# Altium schematic symbol library TitansLib.SchLib: 462 symbols (part 9 of 24)
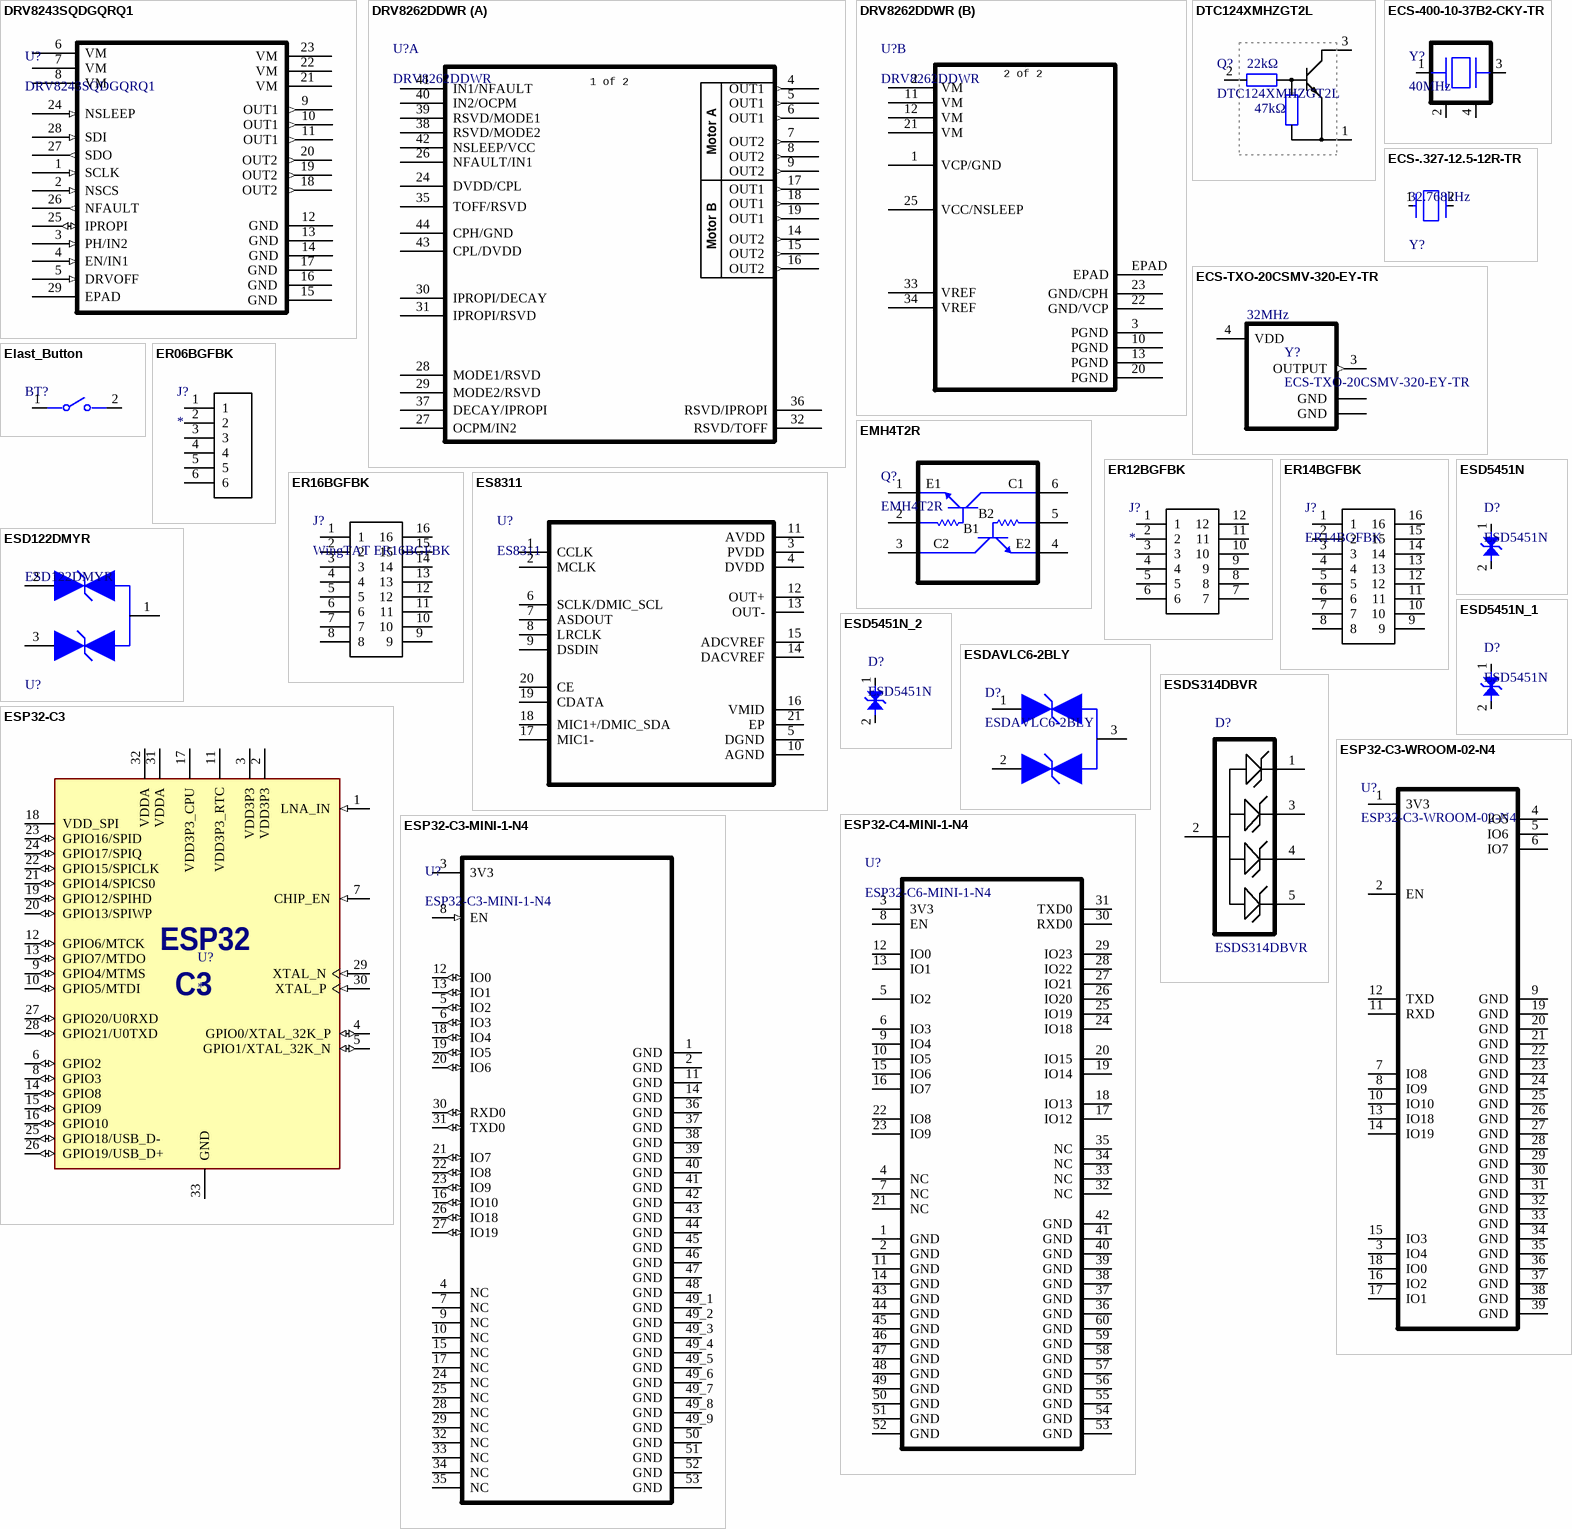
[diagram p25: symbols DRV8243SQDGQRQ1 to ESP32-C4-MINI-1-N4]

## EMH4T2R
designator Q?
Small Signal Bipolar Transistor, 0.1A I(C), 50V V(BR)CEO, 2-Element, NPN, Silicon; Manufacturer: Rohm; Package Body Material: Plastic; Max Collector Current: 100mA; DC Current Gain-Min (hFE): 100; Number of Elements: 2; Power Dissipation-Max (Abs): 150mW; Time @ Peak Reflow Temperature-Max (s): 10s; Transistor Application: SWITCHING; Frequency: 250MHz; Qualification Status: Not Qualified; Supplier: Digikey; Supplier Part Number: EMH4T2RCT-ND; Manufacturer Part Number: EMH4T2R; RoHS: Yes; Category: BJTs; Stock: 19698; Pricing: 1=0.53, 10=0.327, 100=0.2076, 500=0.15612, 1000=0.13948, 2000=0.12547 (USD); Pins: 5; Package Shape: Rectangular; Terminal Finish: Copper; Transistor Element Material: SILICON; Max Operating Temperature: 150°C; JESD-609 Code: e2; Polarity/Channel Type: NPN; Collector-emitter Voltage-Max: 50V; JESD-30 Code: R-PDSO-F5; Moisture Sensitivity Level: 1; Package Style: SMALL OUTLINEMeter; Peak Reflow Temperature (Cel): 260°C; Surface Mount: Yes; Terminal Form: Flat; Terminal Position: DUAL; Reach SVHC Compliant: Yes; RoHS Compliant: Yes; ComponentLink1URL: https://datasheet.ciiva.com:443/pdfs/VipMasterIC/IC/ROHM/ROHM-S-A0002134070/ROHM-S-A0002134651-1.pdf?src-supplier=IHS+Markit; ComponentLink1Description: https://datasheet.ciiva.com:443/pdfs/VipMasterIC/IC/ROHM/ROHM-S-A0002134070/ROHM-S-A0002134651-1.pdf?src-supplier=IHS+Markit; ComponentLink2URL: https://datasheet.ciiva.com/12316/emh4-90829-12316374.pdf?src-supplier=Mouser; ComponentLink2Description: https://datasheet.ciiva.com/12316/emh4-90829-12316374.pdf?src-supplier=Mouser; ComponentLink3URL: https://datasheet.ciiva.com/6361/emh4-6361344.pdf?src-supplier=Digikey; ComponentLink3Description: https://datasheet.ciiva.com/6361/emh4-6361344.pdf?src-supplier=Digikey; ComponentLink4URL: https://datasheet.ciiva.com/29322/140552-da-01-en-transistor-emh-4t2r-sc-107c-29322668.pdf?src-supplier=Conrad; ComponentLink4Description: https://datasheet.ciiva.com/29322/140552-da-01-en-transistor-emh-4t2r-sc-107c-29322668.pdf?src-supplier=Conrad; ComponentLink5URL: https://datasheet.ciiva.com/6361/emh4-6361349.pdf?src-supplier=Digikey; ComponentLink5Description: https://datasheet.ciiva.com/6361/emh4-6361349.pdf?src-supplier=Digikey; ComponentLink6URL: https://datasheet.ciiva.com/11209/emh4-11209231.pdf?src-supplier=Avnet; ComponentLink6Description: https://datasheet.ciiva.com/11209/emh4-11209231.pdf?src-supplier=Avnet; ComponentLink7URL: https://datasheet.ciiva.com/16437/emh4-16437708.pdf?src-supplier=Future+Electronics; ComponentLink7Description: https://datasheet.ciiva.com/16437/emh4-16437708.pdf?src-supplier=Future+Electronics
pins: 1 E1, 2 B1, 3 C2, 4 E2, 5 B2, 6 C1

## ER06BGFBK
designator J?
2.54mm Through Hole,Right Angle,P=2.54mm Edgeboard Connectors RoHS; Manufacturer_Name: WingTAT; Manufacturer_Part_Number: ER06BGFBK; Datasheet Link: https://www.lcsc.com/product-detail/C5173325.html; Height: 7.50mm; LCSC_Part Number: C5173325
footprint ER06BGFBK
pins: 1, 2, 3, 4, 5, 6

## ER12BGFBK
designator J?
2.54mm Through Hole,Right Angle,P=2.54mm Edgeboard Connectors RoHS; Manufacturer_Name: WingTAT; Manufacturer_Part_Number: ER12BGFBK; Datasheet Link: https://www.lcsc.com/product-detail/C5173328.html; Height: 7.50mm; LCSC_Part Number: C5173328
footprint ER12BGFBK
pins: 1, 2, 3, 4, 5, 6, 7, 8, 9, 10, 11, 12

## ER14BGFBK
designator J?
2.54mm Through Hole,Right Angle,P=2.54mm Edgeboard Connectors RoHS; Manufacturer Part Number: ER16BGFBK; Manufacturer: *
footprint ER14BGFBK
pins: 1, 2, 3, 4, 5, 6, 7, 8, 9, 10, 11, 12, 13, 14, 15, 16

## ER16BGFBK
designator J?, comment WingTAT ER16BGFBK
2.54mm Through Hole,Right Angle,P=2.54mm Edgeboard Connectors RoHS; Manufacturer: *; Manufacturer Part Number: ER16BGFBK
footprint ER16BGFBK
pins: 1, 2, 3, 4, 5, 6, 7, 8, 9, 10, 11, 12, 13, 14, 15, 16

## ES8311
designator U?
Low Power Mono Audio CODEC; Manufacturer: Everest Semiconductor; Manufacturer Part Number: ES8311; Supplier: LCSC; Supplier Part Number: C962342; Supplier Unit Price: 0.5532; Datasheet: https://www.lcsc.com/datasheet/C962342.pdf?spm=wm.sxq.inf.ggs&lcsc_vid=QFJcU1NQFVUKBFFURwRcVQVVFgcLUAIDRwddAlJQTlQxVlNeRFBcUlBQTlZeXjsOAxUeFF5JWBYZEEoBGA4JCwFIFA4DSA%3D%3D
footprint QFN40P300X300X60_HS-21N (QFN, 20-Leads, Body 3.00x3.00mm, Pitch 0.40mm, Thermal Pad 1.70x1.70mm, IPC Medium Density)
pins: 1 CCLK, 2 MCLK, 3 PVDD, 4 DVDD, 5 DGND, 6 SCLK/DMIC_SCL, 7 ASDOUT, 8 LRCLK, 9 DSDIN, 10 AGND, 11 AVDD, 12 OUT+, 13 OUT-, 14 DACVREF, 15 ADCVREF, 16 VMID, 17 MIC1-, 18 MIC1+/DMIC_SDA, 19 CDATA, 20 CE, 21 EP

## ESD122DMYR
designator U?
TVS DIODE 3.6V 8.4V 3X2SON; Min Breakdown Voltage: 5.1V; Number of Bidirectional Channels: 2; Power Line Protection: No; Peak Pulse Current: 2.5A; Interface: USB; Peak Pulse Power: 20W; Packaging: Tape and Reel; Clamping Voltage: 8.4V; Number of Pins: 3; Reverse Standoff Voltage: 3.6V; Mount: Surface Mount; Min Operating Temperature: -40°C; Number of Channels: 2; RoHS Compliant: Yes; Max Operating Temperature: 125°C; Resistor Type: Zener
footprint ESD122DMYR
pins: 1 GND (power), 2 IO1, 3 IO2

## ESD5451N
designator D?
ESD Diode DFN1006-2L; Manufacturer: WillSemi; Manufacturer Part Number: ESD5451N-2/TR
footprint DFN65P101X53-2N (DFN, 2-Leads, Body 0.61x1.01mm, Pitch 0.65mm, IPC Medium Density)
pins: 1, 2

## ESD5451N_1
designator D?, comment ESD5451N
ESD Diode DFN1006-2L; Manufacturer: WillSemi; Manufacturer Part Number: ESD5451N-2/TR
footprint DFN65P101X53-2N (DFN, 2-Leads, Body 0.61x1.01mm, Pitch 0.65mm, IPC Medium Density)
pins: 1, 2

## ESD5451N_2
designator D?, comment ESD5451N
ESD Diode DFN1006-2L; Manufacturer: WillSemi; Manufacturer Part Number: ESD5451N-2/TR
footprint DFN65P101X53-2N (DFN, 2-Leads, Body 0.61x1.01mm, Pitch 0.65mm, IPC Medium Density)
pins: 1, 2

## ESDAVLC6-2BLY
designator D?
Trans Voltage Suppressor Diode, 140W, 5V V(RWM), Bidirectional, 2 Element, Silicon, TO-236; Manufacturer: STMicroelectronics; Supplier: Digikey; Supplier Part Number: 497-18402-1-ND; Manufacturer Part Number: ESDAVLC6-2BLY; RoHS: Yes; Category: TVS Diodes; Stock: 14860; Pricing: 1=0.4, 10=0.27, 100=0.107, 500=0.105, 1000=0.103 (USD); Diode Type: TRANS VOLTAGE SUPPRESSOR; Reach SVHC Compliant: Yes; RoHS Compliant: Yes; ComponentLink1URL: https://datasheet.ciiva.com:443/pdfs/VipMasterIC/IC/SGST/SGST-S-A0006719383/SGST-S-A0006719383-1.pdf?src-supplier=IHS+Markit; ComponentLink1Description: https://datasheet.ciiva.com:443/pdfs/VipMasterIC/IC/SGST/SGST-S-A0006719383/SGST-S-A0006719383-1.pdf?src-supplier=IHS+Markit; ComponentLink2URL: http://www.st.com/resource/en/datasheet/esdavlc6-2bly.pdf?src-supplier=Digikey; ComponentLink2Description: http://www.st.com/resource/en/datasheet/esdavlc6-2bly.pdf?src-supplier=Digikey
footprint SOT95P255X125-3N (SOT23, 3-Leads, Body 2.90x2.55mm, Pitch 0.95mm, IPC Medium Density)
pins: 1, 2, 3 GND (power)

## ESDS314DBVR
designator D?
Data-Line Surge and ESD Protection Diode Array; Manufacturer 1: Texas Instruments; Datasheet: http://www.ti.com/lit/gpn/esds314; Height: 1.45mm; Manufacturer Part Number 1: ESDS314DBVR; Supplier Part Number 1: 296-ESDS314DBVRCT-ND; Supplier Link 1: https://www.digikey.com.br/pt/products/detail/texas-instruments/ESDS314DBVR/9655798; Supplier 1: DigiKey; Supplier Unit Price 1: 0.219
footprint SOT95P280X145-5N
pins: 1, 2, 3, 4, 5

## ESP32-C3
designator U?
WiFi Modules (802.11) (Engineering Samples Only) SMD IC ESP32-C3, RISC-V single-core MCU, 2.4G Wi-Fi & BLE 5.0 combo, QFN 32-pin, 5*5 mm, 40 ~ 105C; MF: Espressif Systems; SnapEDA_Link: https://www.snapeda.com/parts/ESP32-C3/Espressif+Systems/view-part/?ref=snap; Package: VFQFN-32 Espressif Systems; Value: *; MP: ESP32-C3; Check_prices: https://www.snapeda.com/parts/ESP32-C3/Espressif+Systems/view-part/?ref=eda
footprint QFN50P500X500X90-33N
pins: 1 LNA_IN (in), 2 VDD3P3 (power), 3 VDD3P3 (power), 4 GPIO0/XTAL_32K_P (io), 5 GPIO1/XTAL_32K_N (io), 6 GPIO2 (io), 7 CHIP_EN (in), 8 GPIO3 (io), 9 GPIO4/MTMS (io), 10 GPIO5/MTDI (io), 11 VDD3P3_RTC (power), 12 GPIO6/MTCK (io), 13 GPIO7/MTDO (io), 14 GPIO8 (io), 15 GPIO9 (io), 16 GPIO10 (io), 17 VDD3P3_CPU (power), 18 VDD_SPI (power), 19 GPIO12/SPIHD (io), 20 GPIO13/SPIWP (io), 21 GPIO14/SPICS0 (io), 22 GPIO15/SPICLK (io), 23 GPIO16/SPID (io), 24 GPIO17/SPIQ (io), 25 GPIO18/USB_D- (io), 26 GPIO19/USB_D+ (io), 27 GPIO20/U0RXD (io), 28 GPIO21/U0TXD (io), 29 XTAL_N (in), 30 XTAL_P (in), 31 VDDA (power), 32 VDDA (power), 33 GND (power)
text: ESP32; C3

## ESP32-C3-MINI-1-N4
designator U?
SMD module, ESP32-C3FH4X, Chip Revision v1.1 or above, PCB antenna, -40C +105C; Manufacturer: Espressif Systems; Manufacturer Part Number: ESP32-C3-MINI-1-H4X; Supplier: Mouser; Supplier Part Number: 356-ESP32C3MINI1H4X; Category: RF Transceiver Modules and Modems; Stock: 5096; Pricing: 1=4, 10=3.57, 50=2.92, 100=2.77, 1000=2.32, 10000=2.21 (USD)
footprint ESP32-C3-MINI-1 (Footprint not found)
pins: 1 GND (power), 2 GND (power), 3 3V3 (power), 4 NC, 5 IO2 (io), 6 IO3 (io), 7 NC, 8 EN (in), 9 NC, 10 NC, 11 GND (power), 12 IO0 (io), 13 IO1 (io), 14 GND (power), 15 NC, 16 IO10 (io), 17 NC, 18 IO4 (io), 19 IO5 (io), 20 IO6 (io), 21 IO7 (io), 22 IO8 (io), 23 IO9 (io), 24 NC, 25 NC, 26 IO18 (io), 27 IO19 (io), 28 NC, 29 NC, 30 RXD0 (io), 31 TXD0 (io), 32 NC, 33 NC, 34 NC, 35 NC, 36 GND (power), 37 GND (power), 38 GND (power), 39 GND (power), 40 GND (power), 41 GND (power), 42 GND (power), 43 GND (power), 44 GND (power), 45 GND (power), 46 GND (power), 47 GND (power), 48 GND (power), 49_1 GND (power), 49_2 GND (power), 49_3 GND (power), 49_4 GND (power), 49_5 GND (power), 49_6 GND (power), 49_7 GND (power), 49_8 GND (power), 49_9 GND (power), 50 GND (power), 51 GND (power), 52 GND (power), 53 GND (power)

## ESP32-C3-WROOM-02-N4
designator U?
Module; Wi-Fi/Bluetooth; transceiver; 4MB FLASH/PSRAM/400KB SRAM/384KB ROM; 3.0-3.6V; 18x20x3.2mm; MF: Espressif Systems; Bandwidth: 72MHz; Data Rate: 150Mbps; Interface: CAN, I2C, I2S, SPI, UART, USB; Clock Frequency: 2.484GHz; Max Supply Voltage: 3.6V; Min Supply Voltage: 3V; Number of GPIO: 15; Value: *; SnapEDA_Link: https://www.snapeda.com/parts/ESP32-C3-WROOM-02-N4/Espressif+Systems/view-part/?ref=snap; Purchase-URL: https://pricing.snapeda.com/search/part/ESP32-C3-WROOM-02-N4/?ref=eda; Availability: In Stock; Price: None; Package: Package; Check_prices: https://www.snapeda.com/parts/ESP32-C3-WROOM-02-N4/Espressif+Systems/view-part/?ref=eda; MP: ESP32-C3-WROOM-02-N4; Supplier: DigiKey; Supplier Part Number: 1965-ESP32-C3-WROOM-02-N4CT-ND; Manufacturer: Espressif Systems; Manufacturer Part Number: ESP32-C3-WROOM-02-N4; RoHS: Compliant; Category: RF Receivers, Transceivers; Stock: 13111; Pricing: 1=3,28, 10=2,836, 25=2,6796, 100=2,4652, 250=2,33652 (USD); Ambient Temperature Range High: 85°C; Height: 3.35mm; Max Operating Temperature: 85°C; Min Operating Temperature: -40°C; ComponentLink1URL: https://datasheet.octopart.com:443/ESP32-C3-WROOM-02-N4-Espressif-Systems-datasheet-188867343.pdf?src-supplier=TME; ComponentLink1Description: https://datasheet.octopart.com:443/ESP32-C3-WROOM-02-N4-Espressif-Systems-datasheet-188867343.pdf?src-supplier=TME; ComponentLink2URL: https://datasheet.octopart.com:443/ESP32-C3-WROOM-02-N4-Espressif-Systems-datasheet-165560559.pdf?src-supplier=TME; ComponentLink2Description: https://datasheet.octopart.com:443/ESP32-C3-WROOM-02-N4-Espressif-Systems-datasheet-165560559.pdf?src-supplier=TME; ComponentLink3URL: https://datasheet.octopart.com:443/ESP32-C3-WROOM-02-N4-Espressif-Systems-datasheet-156944166.pdf?src-supplier=TME; ComponentLink3Description: https://datasheet.octopart.com:443/ESP32-C3-WROOM-02-N4-Espressif-Systems-datasheet-156944166.pdf?src-supplier=TME; ComponentLink4URL: https://datasheet.octopart.com:443/ESP32-C3-WROOM-02-N4-Espressif-Systems-datasheet-156947392.pdf?src-supplier=TME; ComponentLink4Description: https://datasheet.octopart.com:443/ESP32-C3-WROOM-02-N4-Espressif-Systems-datasheet-156947392.pdf?src-supplier=TME; Supplier 1: DigiKey; Supplier Part Number 1: 1965-ESP32-C3-WROOM-02-N4CT-ND; Supplier 2: DigiKey; Supplier Part Number 2: 1965-ESP32-C3-WROOM-02-N4DKR-ND; Supplier 3: Mouser; Supplier Part Number 3: 356-ESP32C3WROOM02N4
footprint MODULE_ESP32-C3-WROOM-02-H4
pins: 1 3V3, 2 EN, 3 IO4, 4 IO5, 5 IO6, 6 IO7, 7 IO8, 8 IO9, 9 GND, 10 IO10, 11 RXD, 12 TXD, 13 IO18, 14 IO19, 15 IO3, 16 IO2, 17 IO1, 18 IO0, 19 GND, 20 GND, 21 GND, 22 GND, 23 GND, 24 GND, 25 GND, 26 GND, 27 GND, 28 GND, 29 GND, 30 GND, 31 GND, 32 GND, 33 GND, 34 GND, 35 GND, 36 GND, 37 GND, 38 GND, 39 GND

## ESP32-C4-MINI-1-N4
designator U?, comment ESP32-C6-MINI-1-N4
Rf Txrx Module Bt Pcb Trace SMD; Manufacturer: Espressif Systems; Supplier: Mouser; Supplier Part Number: 356-ESP32C6MINI-1-N4; Manufacturer Part Number: ESP32-C6-MINI-1-N4; RoHS: No; Category: LDO; Stock: 4502; Pricing: 1=5.03, 10=4.5, 50=3.6, 100=3.45, 1000=2.86, 10000=2.73 (USD); ComponentLink1URL: https://datasheet.octopart.com/ESP32-C6-MINI-1-N4-Espressif-Systems-datasheet-188867343.pdf?src-supplier=TME; ComponentLink1Description: https://datasheet.octopart.com/ESP32-C6-MINI-1-N4-Espressif-Systems-datasheet-188867343.pdf?src-supplier=TME; Supplier 1: Mouser; Supplier Part Number 1: 356-ESP32C6MINI-1-N4; Supplier 2: Digikey; Supplier Part Number 2: 1965-ESP32-C6-MINI-1-N4CT-ND
footprint ESP32C6MINI1N4
pins: 1 GND, 2 GND, 3 3V3, 4 NC, 5 IO2, 6 IO3, 7 NC, 8 EN, 9 IO4 , 10 IO5, 11 GND, 12 IO0, 13 IO1, 14 GND, 15 IO6, 16 IO7, 17 IO12, 18 IO13, 19 IO14, 20 IO15, 21 NC, 22 IO8, 23 IO9, 24 IO18, 25 IO19, 26 IO20, 27 IO21, 28 IO22, 29 IO23, 30 RXD0, 31 TXD0, 32 NC, 33 NC, 34 NC, 35 NC, 36 GND, 37 GND, 38 GND, 39 GND, 40 GND, 41 GND, 42 GND, 43 GND, 44 GND, 45 GND, 46 GND, 47 GND, 48 GND, 49 GND, 50 GND, 51 GND, 52 GND, 53 GND, 54 GND, 55 GND, 56 GND, 57 GND, 58 GND, 59 GND, 60 GND

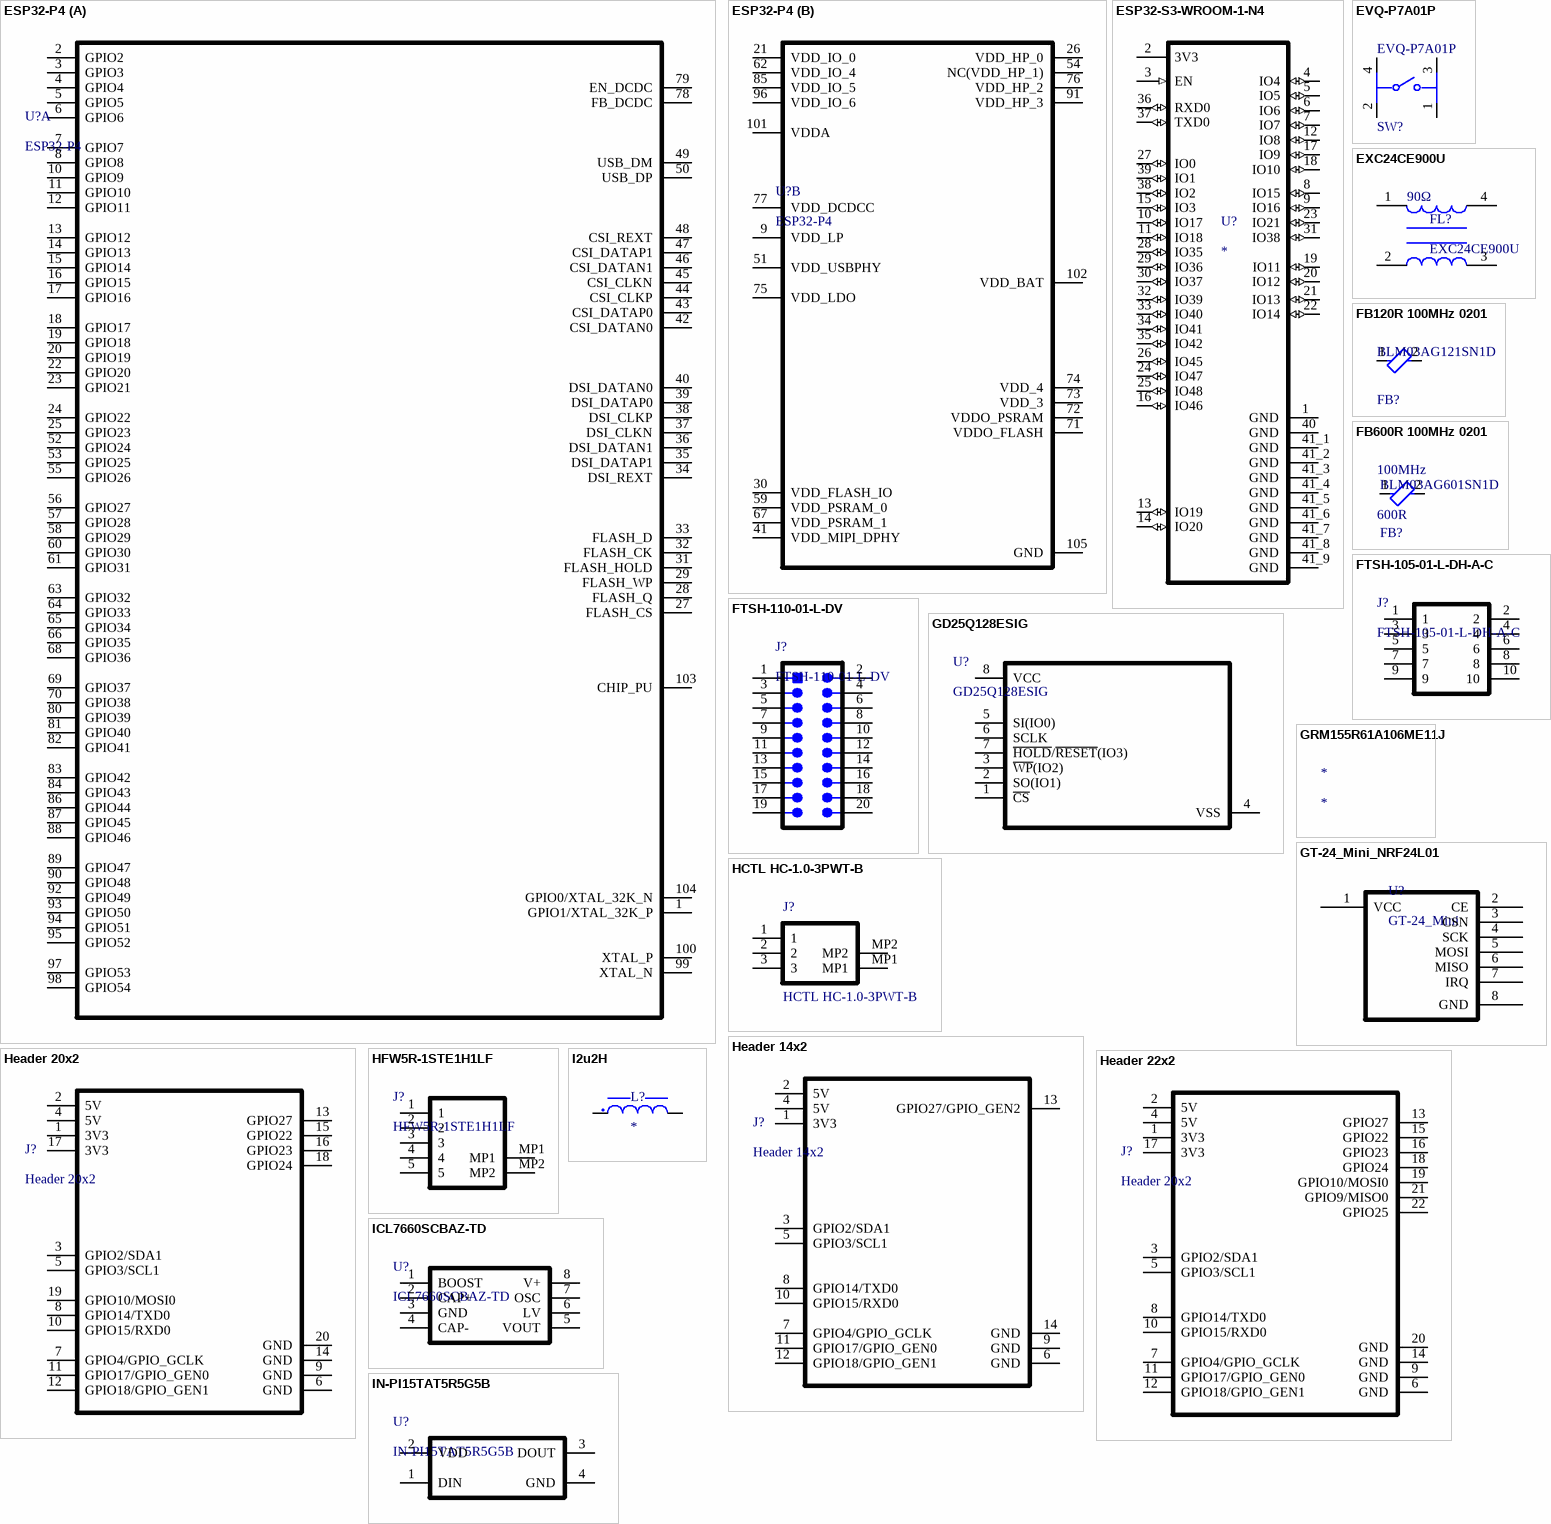
[diagram p5: symbols ESP32-P4 to IN-PI15TAT5R5G5B]

## ESP32-P4
designator U?
footprint QFN35P1000X1000X90_HS-105N (QFN, 104-Leads, Body 10.00x10.00mm, Pitch 0.35mm, Thermal Pad 7.50x7.50mm, IPC Medium Density)
part A pins: 1 GPIO1/XTAL_32K_P, 2 GPIO2, 3 GPIO3, 4 GPIO4, 5 GPIO5, 6 GPIO6, 7 GPIO7, 8 GPIO8, 10 GPIO9, 11 GPIO10, 12 GPIO11, 13 GPIO12, 14 GPIO13, 15 GPIO14, 16 GPIO15, 17 GPIO16, 18 GPIO17, 19 GPIO18, 20 GPIO19, 22 GPIO20, 23 GPIO21, 24 GPIO22, 25 GPIO23, 27 FLASH_CS, 28 FLASH_Q, 29 FLASH_WP, 31 FLASH_HOLD, 32 FLASH_CK, 33 FLASH_D, 34 DSI_REXT, 35 DSI_DATAP1, 36 DSI_DATAN1, 37 DSI_CLKN, 38 DSI_CLKP, 39 DSI_DATAP0, 40 DSI_DATAN0, 42 CSI_DATAN0, 43 CSI_DATAP0, 44 CSI_CLKP, 45 CSI_CLKN, 46 CSI_DATAN1, 47 CSI_DATAP1, 48 CSI_REXT, 49 USB_DM, 50 USB_DP, 52 GPIO24, 53 GPIO25, 55 GPIO26, 56 GPIO27, 57 GPIO28, 58 GPIO29, 60 GPIO30, 61 GPIO31, 63 GPIO32, 64 GPIO33, 65 GPIO34, 66 GPIO35, 68 GPIO36, 69 GPIO37, 70 GPIO38, 78 FB_DCDC, 79 EN_DCDC, 80 GPIO39, 81 GPIO40, 82 GPIO41, 83 GPIO42, 84 GPIO43, 86 GPIO44, 87 GPIO45, 88 GPIO46, 89 GPIO47, 90 GPIO48, 92 GPIO49, 93 GPIO50, 94 GPIO51, 95 GPIO52, 97 GPIO53, 98 GPIO54, 99 XTAL_N, 100 XTAL_P, 103 CHIP_PU, 104 GPIO0/XTAL_32K_N
part B pins: 9 VDD_LP, 21 VDD_IO_0, 26 VDD_HP_0, 30 VDD_FLASH_IO, 41 VDD_MIPI_DPHY, 51 VDD_USBPHY, 54 NC(VDD_HP_1), 59 VDD_PSRAM_0, 62 VDD_IO_4, 67 VDD_PSRAM_1, 71 VDDO_FLASH, 72 VDDO_PSRAM, 73 VDD_3, 74 VDD_4, 75 VDD_LDO, 76 VDD_HP_2, 77 VDD_DCDCC, 85 VDD_IO_5, 91 VDD_HP_3, 96 VDD_IO_6, 101 VDDA, 102 VDD_BAT, 105 GND

## ESP32-S3-WROOM-1-N4
designator U?
MF: {'manufacturer': u'Espressif Systems'}; MP: ESP32-S3-WROOM-1-N4; Package: None; Price: None; Value: *; Availability: Unavailable
footprint XCVR_ESP32-S3-WROOM-1-N4
pins: 1 GND (power), 2 3V3 (power), 3 EN (in), 4 IO4 (io), 5 IO5 (io), 6 IO6 (io), 7 IO7 (io), 8 IO15 (io), 9 IO16 (io), 10 IO17 (io), 11 IO18 (io), 12 IO8 (io), 13 IO19 (io), 14 IO20 (io), 15 IO3 (io), 16 IO46 (io), 17 IO9 (io), 18 IO10 (io), 19 IO11 (io), 20 IO12 (io), 21 IO13 (io), 22 IO14 (io), 23 IO21 (io), 24 IO47 (io), 25 IO48 (io), 26 IO45 (io), 27 IO0 (io), 28 IO35 (io), 29 IO36 (io), 30 IO37 (io), 31 IO38 (io), 32 IO39 (io), 33 IO40 (io), 34 IO41 (io), 35 IO42 (io), 36 RXD0 (io), 37 TXD0 (io), 38 IO2 (io), 39 IO1 (io), 40 GND (power), 41_1 GND (power), 41_2 GND (power), 41_3 GND (power), 41_4 GND (power), 41_5 GND (power), 41_6 GND (power), 41_7 GND (power), 41_8 GND (power), 41_9 GND (power)

## EVQ-P7A01P
designator SW?
Switch Tactile N.O. SPST Rectangular Button Gull Wing 0.05A 12VDC 2.2N SMD Embossed T/R; Manufacturer: Panasonic; Actuator Length: 650µm; Contact Current Rating: 50mA; Contact Resistance: 500mΩ; Electrical Life: 100kcycles; Illumination Type: Non-Illuminated; Insulation Resistance: 100MΩ; Max Voltage Rating (DC): 12V; Number of Positions: 1; Switch Function: Off-Mom; Switch Travel: 200µm; Supplier: DigiKey; Supplier Part Number: P16763CT-ND; Manufacturer Part Number: EVQ-P7A01P; RoHS: Compliant; Category: Tactile Switches; Stock: 51769; Pricing: 1=0.28, 10=0.245, 25=0.2292, 100=0.2056, 250=0.19056, 500=0.17982, 1000=0.16975, 2500=0.15762 (USD); Case/Package: SMD/SMT; Color: Black; Height: 1.35mm; Lead Free: Lead Free; Length: 3.5mm; Life (Cycles): 100kcycles; Lifecycle Status: Production; Max Current Rating: 50mA; Max Operating Temperature: 70°C; Mechanical Life: 100kcycles; Min Operating Temperature: -20°C; Mounting Technology: Surface Mount; Operating Force: 2.2N; Orientation: Right Angle; Radiation Hardening: No; REACH SVHC: Yes; Termination: Gull Wing; Throw Configuration: SPST; Voltage Rating (DC): 12V; ComponentLink1URL: https://datasheet.octopart.com:443/EVQP7A01P-Panasonic-datasheet-180975487.pdf?src-supplier=IHS; ComponentLink1Description: https://datasheet.octopart.com:443/EVQP7A01P-Panasonic-datasheet-180975487.pdf?src-supplier=IHS; ComponentLink2URL: https://datasheet.octopart.com:443/EVQ-P7A01P-Panasonic-datasheet-98950114.pdf?src-supplier=Future+Electronics; ComponentLink2Description: https://datasheet.octopart.com:443/EVQ-P7A01P-Panasonic-datasheet-98950114.pdf?src-supplier=Future+Electronics; ComponentLink3URL: https://datasheet.octopart.com:443/EVQ-P7A01P-Panasonic-datasheet-13271580.pdf?src-supplier=RS+(Formerly+Allied+Electronics); ComponentLink3Description: https://datasheet.octopart.com:443/EVQ-P7A01P-Panasonic-datasheet-13271580.pdf?src-supplier=RS+(Formerly+Allied+Electronics); ComponentLink4URL: https://datasheet.octopart.com:443/EVQ-P7A01P-Panasonic-datasheet-13280430.pdf?src-supplier=RS+(Formerly+Allied+Electronics); ComponentLink4Description: https://datasheet.octopart.com:443/EVQ-P7A01P-Panasonic-datasheet-13280430.pdf?src-supplier=RS+(Formerly+Allied+Electronics); ComponentLink5URL: https://datasheet.octopart.com:443/EVQ-P7A01P-Panasonic-datasheet-22087671.pdf?src-supplier=Electro+Sonic; ComponentLink5Description: https://datasheet.octopart.com:443/EVQ-P7A01P-Panasonic-datasheet-22087671.pdf?src-supplier=Electro+Sonic
footprint FP-EVQ-P7A01P-MFG
pins: 1, 2, 3, 4

## EXC24CE900U
designator FL?  Impedance: 90Ω
EXC Series 90 Ohm 100 MHz 160 mA 1.75 Ohm DCR Common Mode Noise Filter; Manufacturer Lifecycle Status: ACTIVE; Part Series: Common Mode Noise Filters (24CE_for Mbps); MF: Panasonic; Core Material: Ferrite; Current: 160mA; DC Resistance (DCR): 1.75Ω; Element Configuration: Dual; Frequency: 100MHz; Number of Circuits: 2; Shielding: Shielded; Tolerance: 25%; Voltage Rating: 5V; SnapEDA_Link: https://www.snapeda.com/parts/EXC24CE900U/Panasonic/view-part/?ref=snap; Package: 0504 Panasonic; MP: EXC24CE900U; Check_prices: https://www.snapeda.com/parts/EXC24CE900U/Panasonic/view-part/?ref=eda; Supplier 1: Arrow Electronics; Supplier Part Number 1: EXC-24CE900U; Supplier: Arrow Electronics; Supplier Part Number: EXC-24CE900U; Manufacturer: Panasonic; Manufacturer Part Number: EXC24CE900U; RoHS: Compliant; Category: Power Line Filter Modules; Stock: 4288; Pricing: 1=0,183 (USD); Case/Package: SMD/SMT; Case Code (Imperial): 0504; Case Code (Metric): 1210; Current Rating: 160mA; DC Current: 160mA; Depth: 1.15mm; Height: 500µm; Insulation Resistance: 1.75Ω; Lead Free: Lead Free; Length: 1.25mm; Lifecycle Status: Production; Max Current Rating: 160mA; Max DC Current: 160mA; Max Operating Temperature: 85°C; Min Operating Temperature: -40°C; Mounting Technology: Surface Mount; Number of Lines: 2; Pins: 4; Number of Terminals: 4; Packaging: Tape and Reel; REACH SVHC: Yes; Schedule B: 8504500000, 8504500000|8504500000|8504500000|8504500000|8504500000; Termination: SMD/SMT; Test Frequency: 100MHz; Voltage Rating (DC): 5V; Width: 1mm; ComponentLink1URL: https://datasheet.octopart.com:443/EXC24CE900U-Panasonic-datasheet-150570909.pdf?src-supplier=Panasonic; ComponentLink1Description: https://datasheet.octopart.com:443/EXC24CE900U-Panasonic-datasheet-150570909.pdf?src-supplier=Panasonic; ComponentLink2URL: https://datasheet.octopart.com:443/EXC24CE900U-Panasonic-datasheet-13694342.pdf?src-supplier=Newark; ComponentLink2Description: https://datasheet.octopart.com:443/EXC24CE900U-Panasonic-datasheet-13694342.pdf?src-supplier=Newark; ComponentLink3URL: https://datasheet.octopart.com:443/EXC24CE900U-Panasonic-datasheet-44403855.pdf?src-supplier=Newark; ComponentLink3Description: https://datasheet.octopart.com:443/EXC24CE900U-Panasonic-datasheet-44403855.pdf?src-supplier=Newark; ComponentLink4URL: https://datasheet.octopart.com:443/EXC-24CE900U-Panasonic-datasheet-154766213.pdf?src-supplier=Master+Electronics; ComponentLink4Description: https://datasheet.octopart.com:443/EXC-24CE900U-Panasonic-datasheet-154766213.pdf?src-supplier=Master+Electronics; ComponentLink5URL: https://datasheet.octopart.com:443/EXC-24CE900U-Panasonic-datasheet-131458511.pdf?src-supplier=ODG+(Origin+Data+Global); ComponentLink5Description: https://datasheet.octopart.com:443/EXC-24CE900U-Panasonic-datasheet-131458511.pdf?src-supplier=ODG+(Origin+Data+Global); ComponentLink6URL: https://datasheet.octopart.com:443/EXC24CE900U-Panasonic-datasheet-10412253.pdf?src-supplier=Farnell; ComponentLink6Description: https://datasheet.octopart.com:443/EXC24CE900U-Panasonic-datasheet-10412253.pdf?src-supplier=Farnell; ComponentLink7URL: https://datasheet.octopart.com:443/EXC-24CE900U-Panasonic-datasheet-175642387.pdf?src-supplier=Arrow.cn; ComponentLink7Description: https://datasheet.octopart.com:443/EXC-24CE900U-Panasonic-datasheet-175642387.pdf?src-supplier=Arrow.cn; ComponentLink8URL: https://datasheet.octopart.com:443/EXC-24CE900U-Panasonic-datasheet-166300093.pdf?src-supplier=Arrow.cn; ComponentLink8Description: https://datasheet.octopart.com:443/EXC-24CE900U-Panasonic-datasheet-166300093.pdf?src-supplier=Arrow.cn; ComponentLink9URL: https://datasheet.octopart.com:443/EXC-24CE900U-Panasonic-datasheet-100337409.pdf?src-supplier=Future+Electronics; ComponentLink9Description: https://datasheet.octopart.com:443/EXC-24CE900U-Panasonic-datasheet-100337409.pdf?src-supplier=Future+Electronics; ComponentLink10URL: https://datasheet.octopart.com:443/EXC-24CE900U-Panasonic-datasheet-68299101.pdf?src-supplier=Future+Electronics; ComponentLink10Description: https://datasheet.octopart.com:443/EXC-24CE900U-Panasonic-datasheet-68299101.pdf?src-supplier=Future+Electronics; ComponentLink11URL: https://datasheet.octopart.com:443/EXC-24CE900U-Panasonic-datasheet-27908912.pdf?src-supplier=Electro+Sonic; ComponentLink11Description: https://datasheet.octopart.com:443/EXC-24CE900U-Panasonic-datasheet-27908912.pdf?src-supplier=Electro+Sonic; ComponentLink12URL: https://datasheet.octopart.com:443/EXC-24CE900U-Panasonic-datasheet-41393600.pdf?src-supplier=Electro+Sonic; ComponentLink12Description: https://datasheet.octopart.com:443/EXC-24CE900U-Panasonic-datasheet-41393600.pdf?src-supplier=Electro+Sonic; ComponentLink13URL: https://datasheet.octopart.com:443/EXC-24CE900U-Panasonic-datasheet-26756.pdf?src-supplier=DigiKey; ComponentLink13Description: https://datasheet.octopart.com:443/EXC-24CE900U-Panasonic-datasheet-26756.pdf?src-supplier=DigiKey; Value: *
footprint FIL_EXC24CB102U
pins: 1, 2, 3, 4

## FB120R 100MHz 0201
designator FB?, comment BLM03AG121SN1D
Ferrite Beads Multi-Layer 120Ohm 25% 100MHz 200mA 500mOhm DCR 0201 Paper T/R; Manufacturer: Murata; DC Resistance (DCR): 500mΩ; Impedance: 120Ω; Material: Ferrite, Steel; Number of Circuits: 1; Shielding: Unshielded; Supplier: DigiKey; Supplier Part Number: 490-2557-1-ND; Manufacturer Part Number: BLM03AG121SN1D; RoHS: Compliant; Category: Ferrite Beads and Chips; Stock: 179628; Pricing: 1=0.1, 10=0.024, 25=0.0212, 50=0.0192, 100=0.0172, 250=0.01492, 500=0.01336, 1000=0.01191, 5000=0.00895 (USD); Case/Package: 0201; Case Code (Imperial): 0201; Case Code (Metric): 0603; Contact Plating: Tin; Core Material: Ferrite; Country of Origin: Japan; Current Rating: 200mA; Depth: 330µm; Export Control Classification Number (ECCN) Code: EAR99; Frequency: 100MHz; Height: 300µm; Harmonized Tariff Schedule (HTS) Code: 8504.50.80.00; Introduction Date: 2003-03-12; Lead Free: Lead Free; Length: 600µm; Lifecycle Status: Production; Max Current Rating: 200mA; Max DC Current: 200mA; Clock Frequency: 100MHz; Max Operating Temperature: 125°C; Min Operating Temperature: -55°C; Number of Lines: 1; Pins: 2; Number of Terminals: 2; Packaging: Tape and Reel; REACH SVHC: Yes; RMS Current (Irms): 200mA; Schedule B: 8504500000, 8504500000|8504500000|8504500000|8504500000|8504500000; ESR: 500mΩ; Termination: SMD/SMT; Test Frequency: 100MHz; Tolerance: 25%; Width: 300µm; ComponentLink1URL: https://datasheet.octopart.com:443/BLM03AG121SN1D-Murata-datasheet-180806233.pdf?src-supplier=IHS; ComponentLink1Description: https://datasheet.octopart.com:443/BLM03AG121SN1D-Murata-datasheet-180806233.pdf?src-supplier=IHS; ComponentLink2URL: https://datasheet.octopart.com:443/BLM03AG121SN1D-Murata-datasheet-12522583.pdf?src-supplier=Upverter; ComponentLink2Description: https://datasheet.octopart.com:443/BLM03AG121SN1D-Murata-datasheet-12522583.pdf?src-supplier=Upverter; ComponentLink3URL: https://datasheet.octopart.com:443/BLM03AG121SN1D-Murata-datasheet-10083551.pdf?src-supplier=Upverter; ComponentLink3Description: https://datasheet.octopart.com:443/BLM03AG121SN1D-Murata-datasheet-10083551.pdf?src-supplier=Upverter; ComponentLink4URL: https://datasheet.octopart.com:443/BLM03AG121SN1D-Murata-datasheet-8508678.pdf?src-supplier=Upverter; ComponentLink4Description: https://datasheet.octopart.com:443/BLM03AG121SN1D-Murata-datasheet-8508678.pdf?src-supplier=Upverter; ComponentLink5URL: https://datasheet.octopart.com:443/BLM03AG121SN1D-Murata-datasheet-11756815.pdf?src-supplier=Future+Electronics; ComponentLink5Description: https://datasheet.octopart.com:443/BLM03AG121SN1D-Murata-datasheet-11756815.pdf?src-supplier=Future+Electronics; ComponentLink6URL: https://datasheet.octopart.com:443/BLM03AG121SN1D-Murata-datasheet-78375072.pdf?src-supplier=Future+Electronics; ComponentLink6Description: https://datasheet.octopart.com:443/BLM03AG121SN1D-Murata-datasheet-78375072.pdf?src-supplier=Future+Electronics; ComponentLink7URL: https://datasheet.octopart.com:443/BLM03AG121SN1D-Murata-datasheet-8326661.pdf?src-supplier=Future+Electronics; ComponentLink7Description: https://datasheet.octopart.com:443/BLM03AG121SN1D-Murata-datasheet-8326661.pdf?src-supplier=Future+Electronics; ComponentLink8URL: https://datasheet.octopart.com:443/BLM03AG121SN1D-Murata-datasheet-11030792.pdf?src-supplier=element14+APAC; ComponentLink8Description: https://datasheet.octopart.com:443/BLM03AG121SN1D-Murata-datasheet-11030792.pdf?src-supplier=element14+APAC; ComponentLink9URL: https://datasheet.octopart.com:443/BLM03AG121SN1D-Murata-datasheet-165578259.pdf?src-supplier=TME; ComponentLink9Description: https://datasheet.octopart.com:443/BLM03AG121SN1D-Murata-datasheet-165578259.pdf?src-supplier=TME; ComponentLink10URL: https://datasheet.octopart.com:443/BLM03AG121SN1D-Murata-datasheet-141257717.pdf?src-supplier=Ciiva; ComponentLink10Description: https://datasheet.octopart.com:443/BLM03AG121SN1D-Murata-datasheet-141257717.pdf?src-supplier=Ciiva; ComponentLink11URL: https://datasheet.octopart.com:443/BLM03AG121SN1D-Murata-datasheet-138706305.pdf?src-supplier=Ciiva; ComponentLink11Description: https://datasheet.octopart.com:443/BLM03AG121SN1D-Murata-datasheet-138706305.pdf?src-supplier=Ciiva; ComponentLink12URL: https://datasheet.octopart.com/BLM03AG121SN1D-Murata-datasheet-37129980.pdf; ComponentLink12Description: https://datasheet.octopart.com/BLM03AG121SN1D-Murata-datasheet-37129980.pdf; ComponentLink13URL: https://datasheet.octopart.com:443/BLM03AG121SN1D-Murata-datasheet-153850.pdf?src-supplier=Mouser; ComponentLink13Description: https://datasheet.octopart.com:443/BLM03AG121SN1D-Murata-datasheet-153850.pdf?src-supplier=Mouser; ComponentLink14URL: https://datasheet.octopart.com:443/BLM03AG121SN1D-Murata-datasheet-46664.pdf?src-supplier=DigiKey; ComponentLink14Description: https://datasheet.octopart.com:443/BLM03AG121SN1D-Murata-datasheet-46664.pdf?src-supplier=DigiKey; ComponentLink15URL: http://sigma.octopart.com:80/reach_statement/Murata-company-16.pdf?src-supplier=Compliance+Statements; ComponentLink15Description: http://sigma.octopart.com:80/reach_statement/Murata-company-16.pdf?src-supplier=Compliance+Statements
footprint FB0201
pins: 1, 2

## FB600R 100MHz 0201
designator FB?, comment BLM03AG601SN1D  Impedance: 600R  Test Frequency: 100MHz
Ferrite Beads Multi-Layer 600Ohm 25% 100MHz 100mA 1.5Ohm DCR 0201 Paper T/R; Manufacturer: Murata; DC Resistance (DCR): 1.5Ω; Material: Ferrite, Steel; Number of Circuits: 1; Supplier: DigiKey; Supplier Part Number: 490-5164-1-ND; Manufacturer Part Number: BLM03AG601SN1D; RoHS: Compliant; Category: Ferrite Beads and Chips; Stock: 407684; Pricing: 1=0.1, 10=0.024, 25=0.0212, 50=0.0192, 100=0.0172, 250=0.01492, 500=0.01336, 1000=0.01191, 5000=0.00895 (USD); Case/Package: 0201; Case Code (Imperial): 0201; Case Code (Metric): 0603; Contact Plating: Tin; Core Material: Ferrite; Country of Origin: Japan; Current Rating: 100mA; Depth: 330µm; Export Control Classification Number (ECCN) Code: EAR99; Height: 300µm; Harmonized Tariff Schedule (HTS) Code: 8504.50.80.00; Introduction Date: 2005-03-04; Lead Free: Lead Free; Length: 600µm; Lifecycle Status: Production; Max Current Rating: 100mA; Max DC Current: 100mA; Clock Frequency: 100MHz; Max Operating Temperature: 125°C; Min Operating Temperature: -55°C; Number of Lines: 1; Pins: 2; Number of Terminals: 2; Packaging: Tape and Reel; REACH SVHC: Yes; RMS Current (Irms): 100mA; Schedule B: 8504500000, 8504500000|8504500000|8504500000|8504500000|8504500000; ESR: 1.5Ω; Termination: SMD/SMT; Tolerance: 25%; Width: 300µm; ComponentLink1URL: https://datasheet.octopart.com:443/BLM03AG601SN1D-Murata-datasheet-180806237.pdf?src-supplier=IHS; ComponentLink1Description: https://datasheet.octopart.com:443/BLM03AG601SN1D-Murata-datasheet-180806237.pdf?src-supplier=IHS; ComponentLink2URL: https://datasheet.octopart.com:443/BLM03AG601SN1D-Murata-datasheet-12522583.pdf?src-supplier=Upverter; ComponentLink2Description: https://datasheet.octopart.com:443/BLM03AG601SN1D-Murata-datasheet-12522583.pdf?src-supplier=Upverter; ComponentLink3URL: https://datasheet.octopart.com:443/BLM03AG601SN1D-Murata-datasheet-10083551.pdf?src-supplier=Upverter; ComponentLink3Description: https://datasheet.octopart.com:443/BLM03AG601SN1D-Murata-datasheet-10083551.pdf?src-supplier=Upverter; ComponentLink4URL: https://datasheet.octopart.com:443/BLM03AG601SN1D-Murata-datasheet-8508678.pdf?src-supplier=Upverter; ComponentLink4Description: https://datasheet.octopart.com:443/BLM03AG601SN1D-Murata-datasheet-8508678.pdf?src-supplier=Upverter; ComponentLink5URL: https://datasheet.octopart.com:443/BLM03AG601SN1D-Murata-datasheet-141273597.pdf?src-supplier=element14+APAC; ComponentLink5Description: https://datasheet.octopart.com:443/BLM03AG601SN1D-Murata-datasheet-141273597.pdf?src-supplier=element14+APAC; ComponentLink6URL: https://datasheet.octopart.com:443/BLM03AG601SN1D-Murata-datasheet-11756815.pdf?src-supplier=Future+Electronics; ComponentLink6Description: https://datasheet.octopart.com:443/BLM03AG601SN1D-Murata-datasheet-11756815.pdf?src-supplier=Future+Electronics; ComponentLink7URL: https://datasheet.octopart.com:443/BLM03AG601SN1D-Murata-datasheet-78375072.pdf?src-supplier=Future+Electronics; ComponentLink7Description: https://datasheet.octopart.com:443/BLM03AG601SN1D-Murata-datasheet-78375072.pdf?src-supplier=Future+Electronics; ComponentLink8URL: https://datasheet.octopart.com:443/BLM03AG601SN1D-Murata-datasheet-141257719.pdf?src-supplier=Ciiva; ComponentLink8Description: https://datasheet.octopart.com:443/BLM03AG601SN1D-Murata-datasheet-141257719.pdf?src-supplier=Ciiva; ComponentLink9URL: https://datasheet.octopart.com:443/BLM03AG601SN1D-Murata-datasheet-138706314.pdf?src-supplier=Ciiva; ComponentLink9Description: https://datasheet.octopart.com:443/BLM03AG601SN1D-Murata-datasheet-138706314.pdf?src-supplier=Ciiva; ComponentLink10URL: https://datasheet.octopart.com/BLM03AG601SN1D-Murata-datasheet-37129980.pdf; ComponentLink10Description: https://datasheet.octopart.com/BLM03AG601SN1D-Murata-datasheet-37129980.pdf; ComponentLink11URL: http://sigma.octopart.com:80/reach_statement/Murata-company-16.pdf?src-supplier=Compliance+Statements; ComponentLink11Description: http://sigma.octopart.com:80/reach_statement/Murata-company-16.pdf?src-supplier=Compliance+Statements; Supplier 1: DigiKey; Supplier Part Number 1: 490-5164-1-ND; Supplier 2: DigiKey; Supplier Part Number 2: 490-5164-2-ND; Supplier 3: Mouser; Supplier Part Number 3: 81-BLM03AG601SN1D
footprint FB0201
pins: 1, 2

## FTSH-105-01-L-DH-A-C
designator J?
Connector Header Surface Mount, Right Angle 10 position 0.050" (1.27mm); Manufacturer 1: SAMTEC; Datasheet Link: https://suddendocs.samtec.com/catalog_english/ftsh_smt.pdf; Height: 5.33mm; Manufacturer Part Number 1: FTSH-105-01-L-DH; Supplier Part Number 1: SAM1160-05-ND; Supplier Link 1: https://www.digikey.com.br/en/products/detail/samtec-inc/FTSH-105-01-L-DH/1110173; Supplier Unit Price 1: 2.2; Supplier 1: DigiKey
footprint FTSH-105-01-L-DH-A-C
pins: 1, 2, 3, 4, 5, 6, 7, 8, 9, 10

## FTSH-110-01-L-DV
designator J?
Conn Unshrouded Header HDR 20 POS 1.27mm Solder ST Top Entry SMD TIGERCLAW™ Tube; Manufacturer: Samtec; Manufacturer Lifecycle Status: PRODUCTION; Connector Type: Male Pin; Current Rating: 3.4A; Gender: Male; Max Current Rating: 1.75A; Number of Contacts: 20; Supplier: DigiKey; Supplier Part Number: SAM1161-10-ND; Manufacturer Part Number: FTSH-110-01-L-DV; RoHS: Compliant; Category: Headers and Wire Housings; Stock: 1216; Pricing: 1=2.37, 10=2.01, 100=1.7084, 500=1.52494, 1000=1.52292 (USD); Color: Black; Contact Material: Gold; Contact Mating Length: 3.048mm; Contact Plating: Gold; Depth: 3.43mm; Height: 5.97mm; Housing Color: Black; Lead Free: Lead Free; Length: 12.7mm; Lifecycle Status: Production; Max Operating Temperature: 125°C; Manufacturer Package Identifier: FTSH-110-01-L-DV; Min Operating Temperature: -55°C; Mounting Technology: Surface Mount; Pins: 20; Number of Positions: 20; Number of Rows: 2; Packaging: Bulk; Pitch: 1.27mm; Radiation Hardening: No; REACH SVHC: No; Row Spacing: 1.27mm; Termination: Solder; ComponentLink1URL: https://datasheet.octopart.com:443/FTSH-110-01-L-DV-Samtec-datasheet-140825048.pdf?src-supplier=Electro+Sonic; ComponentLink1Description: https://datasheet.octopart.com:443/FTSH-110-01-L-DV-Samtec-datasheet-140825048.pdf?src-supplier=Electro+Sonic; ComponentLink2URL: https://datasheet.octopart.com:443/FTSH-110-01-L-DV-Samtec-datasheet-33007714.pdf?src-supplier=Electro+Sonic; ComponentLink2Description: https://datasheet.octopart.com:443/FTSH-110-01-L-DV-Samtec-datasheet-33007714.pdf?src-supplier=Electro+Sonic; ComponentLink3URL: https://datasheet.octopart.com:443/FTSH-110-01-L-DV-Samtec-datasheet-37173854.pdf?src-supplier=Electro+Sonic; ComponentLink3Description: https://datasheet.octopart.com:443/FTSH-110-01-L-DV-Samtec-datasheet-37173854.pdf?src-supplier=Electro+Sonic; ComponentLink4URL: https://datasheet.octopart.com:443/FTSH-110-01-L-DV-Samtec-datasheet-86818370.pdf?src-supplier=Upverter; ComponentLink4Description: https://datasheet.octopart.com:443/FTSH-110-01-L-DV-Samtec-datasheet-86818370.pdf?src-supplier=Upverter; ComponentLink5URL: https://sigma.octopart.com:443/138897706/technical_drawing/Samtec-FTSH-110-01-L-DV.pdf?src-supplier=Upverter; ComponentLink5Description: https://sigma.octopart.com:443/138897706/technical_drawing/Samtec-FTSH-110-01-L-DV.pdf?src-supplier=Upverter; ComponentLink6URL: https://sigma.octopart.com:443/140871554/technical_drawing/Samtec-FTSH-110-01-L-DV.pdf?src-supplier=Samtec; ComponentLink6Description: https://sigma.octopart.com:443/140871554/technical_drawing/Samtec-FTSH-110-01-L-DV.pdf?src-supplier=Samtec; ComponentLink7URL: https://sigma.octopart.com:443/97029548/technical_drawing/Samtec-FTSH-110-01-L-DV.pdf?src-supplier=Samtec; ComponentLink7Description: https://sigma.octopart.com:443/97029548/technical_drawing/Samtec-FTSH-110-01-L-DV.pdf?src-supplier=Samtec; ComponentLink8URL: https://datasheet.octopart.com:443/FTSH-110-01-L-DV-Samtec-datasheet-97029545.pdf?src-supplier=Samtec; ComponentLink8Description: https://datasheet.octopart.com:443/FTSH-110-01-L-DV-Samtec-datasheet-97029545.pdf?src-supplier=Samtec; ComponentLink9URL: https://datasheet.octopart.com:443/FTSH-110-01-L-DV-Samtec-datasheet-62087996.pdf?src-supplier=Newark; ComponentLink9Description: https://datasheet.octopart.com:443/FTSH-110-01-L-DV-Samtec-datasheet-62087996.pdf?src-supplier=Newark; ComponentLink10URL: https://datasheet.octopart.com:443/FTSH-110-01-L-DV-Samtec-datasheet-100454331.pdf?src-supplier=Master+Electronics; ComponentLink10Description: https://datasheet.octopart.com:443/FTSH-110-01-L-DV-Samtec-datasheet-100454331.pdf?src-supplier=Master+Electronics; ComponentLink11URL: https://datasheet.octopart.com:443/FTSH-110-01-L-DV-Samtec-datasheet-8459893.pdf?src-supplier=Farnell; ComponentLink11Description: https://datasheet.octopart.com:443/FTSH-110-01-L-DV-Samtec-datasheet-8459893.pdf?src-supplier=Farnell; ComponentLink12URL: https://datasheet.octopart.com:443/FTSH-110-01-L-DV-Samtec-datasheet-5313432.pdf?src-supplier=Farnell; ComponentLink12Description: https://datasheet.octopart.com:443/FTSH-110-01-L-DV-Samtec-datasheet-5313432.pdf?src-supplier=Farnell; ComponentLink13URL: https://datasheet.octopart.com:443/FTSH-110-01-L-DV-Samtec-datasheet-5307899.pdf?src-supplier=Farnell; ComponentLink13Description: https://datasheet.octopart.com:443/FTSH-110-01-L-DV-Samtec-datasheet-5307899.pdf?src-supplier=Farnell; ComponentLink14URL: https://datasheet.octopart.com:443/FTSH-110-01-L-DV-Samtec-datasheet-5314914.pdf?src-supplier=element14+APAC; ComponentLink14Description: https://datasheet.octopart.com:443/FTSH-110-01-L-DV-Samtec-datasheet-5314914.pdf?src-supplier=element14+APAC; ComponentLink15URL: https://datasheet.octopart.com:443/FTSH-110-01-L-DV-Samtec-datasheet-183475175.pdf?src-supplier=JRH+Electronics; ComponentLink15Description: https://datasheet.octopart.com:443/FTSH-110-01-L-DV-Samtec-datasheet-183475175.pdf?src-supplier=JRH+Electronics; ComponentLink16URL: https://datasheet.octopart.com:443/FTSH-110-01-L-DV-Samtec-datasheet-176663386.pdf?src-supplier=Toby+Electronics; ComponentLink16Description: https://datasheet.octopart.com:443/FTSH-110-01-L-DV-Samtec-datasheet-176663386.pdf?src-supplier=Toby+Electronics; ComponentLink17URL: https://datasheet.octopart.com:443/FTSH-110-01-L-DV-Samtec-datasheet-133497664.pdf?src-supplier=Toby+Electronics; ComponentLink17Description: https://datasheet.octopart.com:443/FTSH-110-01-L-DV-Samtec-datasheet-133497664.pdf?src-supplier=Toby+Electronics; ComponentLink18URL: https://datasheet.octopart.com:443/FTSH-110-01-L-DV-Samtec-datasheet-116535196.pdf?src-supplier=Toby+Electronics; ComponentLink18Description: https://datasheet.octopart.com:443/FTSH-110-01-L-DV-Samtec-datasheet-116535196.pdf?src-supplier=Toby+Electronics; ComponentLink19URL: https://datasheet.octopart.com:443/FTSH-110-01-L-DV-Samtec-datasheet-151470459.pdf?src-supplier=Sager+Electronics; ComponentLink19Description: https://datasheet.octopart.com:443/FTSH-110-01-L-DV-Samtec-datasheet-151470459.pdf?src-supplier=Sager+Electronics; ComponentLink20URL: https://datasheet.octopart.com:443/FTSH-110-01-L-DV-Samtec-datasheet-151470458.pdf?src-supplier=Sager+Electronics; ComponentLink20Description: https://datasheet.octopart.com:443/FTSH-110-01-L-DV-Samtec-datasheet-151470458.pdf?src-supplier=Sager+Electronics; ComponentLink21URL: https://datasheet.octopart.com:443/FTSH-110-01-L-DV-Samtec-datasheet-150877546.pdf?src-supplier=Sager+Electronics; ComponentLink21Description: https://datasheet.octopart.com:443/FTSH-110-01-L-DV-Samtec-datasheet-150877546.pdf?src-supplier=Sager+Electronics; Supplier 1: DigiKey; Supplier Part Number 1: SAM1161-10-ND; Supplier 2: Mouser; Supplier Part Number 2: 200-FTSH11001LDV
footprint FTSH-110-01-L-DV (CONN, 20-Leads, Body 12.7x3.43mm, Pitch 1.27mm)
pins: 1, 2, 3, 4, 5, 6, 7, 8, 9, 10, 11, 12, 13, 14, 15, 16, 17, 18, 19, 20

## GD25Q128ESIG
designator U?
Flash, 128MX1, PDSO8; Manufacturer: GigaDevice; Supplier: Mouser; Supplier Part Number: 363-GD25Q128ESIG; Manufacturer Part Number: GD25Q128ESIG; RoHS: No; Stock: 5588; Pricing: 1=1.92, 10=1.75, 50=1.59, 100=1.59, 1000=1.42, 10000=1.33 (USD)
footprint SOP127P790X216-8N (SOP, 8-Leads, Body 5.23x5.28mm, Pitch 1.27mm, IPC Medium Density)
pins: 1 ~{CS}, 2 SO(IO1), 3 ~{WP}(IO2), 4 VSS, 5 SI(IO0), 6 SCLK, 7 ~{HOLD}/~{RESET}(IO3), 8 VCC

## GRM155R61A106ME11J
designator *
Cap, Mlcc, 10Uf, X5R, 10V, 0402 Rohs Compliant: Yes |Murata Manufacturing Co., Ltd. GRM155R61A106ME11J; Manufacturer: Murata; Manufacturer Lifecycle Status: IN PRODUCTION; Value: 10µF; Dielectric Material: Ceramic; Tolerance: 20%; Supplier: Arrow Electronics; Supplier Part Number: GRM155R61A106ME11J; Manufacturer Part Number: GRM155R61A106ME11J; RoHS: Compliant; Category: Ceramic Capacitors; Stock: 400000; Pricing: 40000=0,1108, 80000=0,1097, 120000=0,1085, 200000=0,1075, 240000=0,1064, 400000=0,1052 (USD); Case/Package: 0402; Country of Origin: Philippines; Dielectric: X5R; Export Control Classification Number (ECCN) Code: EAR99; Height: 500µm; Harmonized Tariff Schedule (HTS) Code: 8532.24.00.20; Introduction Date: 2018-10-26; Length: 1mm; Lifecycle Status: Production; Material: Ceramic; Max Operating Temperature: 85°C; Min Operating Temperature: -55°C; Mounting Technology: Surface Mount; Number of Terminals: 2; REACH SVHC: Yes; Thickness: 500µm; Voltage Rating: 10V; Voltage Rating (DC): 10V; Width: 500µm; ComponentLink1URL: https://datasheet.octopart.com:443/GRM155R61A106ME11J-Murata-datasheet-165579666.pdf?src-supplier=TME; ComponentLink1Description: https://datasheet.octopart.com:443/GRM155R61A106ME11J-Murata-datasheet-165579666.pdf?src-supplier=TME; ComponentLink2URL: https://datasheet.octopart.com:443/GRM155R61A106ME11J-Murata-datasheet-141266224.pdf?src-supplier=Ciiva; ComponentLink2Description: https://datasheet.octopart.com:443/GRM155R61A106ME11J-Murata-datasheet-141266224.pdf?src-supplier=Ciiva; ComponentLink3URL: https://datasheet.octopart.com:443/GRM155R61A106ME11J-Murata-datasheet-140689744.pdf?src-supplier=Ciiva; ComponentLink3Description: https://datasheet.octopart.com:443/GRM155R61A106ME11J-Murata-datasheet-140689744.pdf?src-supplier=Ciiva; ComponentLink4URL: https://datasheet.octopart.com:443/GRM155R61A106ME11J-Murata-datasheet-138740692.pdf?src-supplier=Ciiva; ComponentLink4Description: https://datasheet.octopart.com:443/GRM155R61A106ME11J-Murata-datasheet-138740692.pdf?src-supplier=Ciiva; ComponentLink5URL: https://datasheet.octopart.com/GRM155R61A106ME11J-Murata-datasheet-12515295.pdf; ComponentLink5Description: https://datasheet.octopart.com/GRM155R61A106ME11J-Murata-datasheet-12515295.pdf; ComponentLink6URL: https://datasheet.octopart.com/GRM155R61A106ME11J-Murata-datasheet-12510076.pdf; ComponentLink6Description: https://datasheet.octopart.com/GRM155R61A106ME11J-Murata-datasheet-12510076.pdf; ComponentLink7URL: https://datasheet.octopart.com/GRM155R61A106ME11J-Murata-datasheet-11978611.pdf; ComponentLink7Description: https://datasheet.octopart.com/GRM155R61A106ME11J-Murata-datasheet-11978611.pdf; ComponentLink8URL: https://datasheet.octopart.com/GRM155R61A106ME11J-Murata-datasheet-10025737.pdf; ComponentLink8Description: https://datasheet.octopart.com/GRM155R61A106ME11J-Murata-datasheet-10025737.pdf; ComponentLink9URL: https://datasheet.octopart.com/GRM155R61A106ME11J-Murata-datasheet-8819587.pdf; ComponentLink9Description: https://datasheet.octopart.com/GRM155R61A106ME11J-Murata-datasheet-8819587.pdf; ComponentLink10URL: http://sigma.octopart.com:80/reach_statement/Murata-company-16.pdf?src-supplier=Compliance+Statements; ComponentLink10Description: http://sigma.octopart.com:80/reach_statement/Murata-company-16.pdf?src-supplier=Compliance+Statements

## GT-24_Mini_NRF24L01
designator U?, comment GT-24_Mini
3.3v GT-24 SMD NRF24L01
footprint GT-24 SMD NRF24L01 (Chip Array, Concave, 16-Leads, Pitch 1,27mm,  Body 14,75x18,65mm,  IPC Low Density)
pins: 1 VCC, 2 CE, 3 CSN, 4 SCK, 5 MOSI, 6 MISO, 7 IRQ, 8 GND

## HCTL HC-1.0-3PWT-B
designator J?
Connector Header 3 position 1mm Pitch 1A Surface Mount, Right Angle -25℃ +85℃; Suppler Unit Price 1: 0.57; Datasheet: https://www.lcsc.com/datasheet/C5372879.pdf; Height: 3.2mm; Manufacturer 1: HCTL; Manufacturer Part Number 1: HCTL HC-1.0-3PWT-B; Supplier Part Number 1: C5372879; Supplier 1: LCSC; Supplier Link 1: https://www.lcsc.com/product-detail/C5372879.html
footprint HCTL HC-1.0-3PWT-B
pins: 1, 2, 3, MP1, MP2

## Header 14x2
designator J?
Conn Unshrouded Header HDR 14 POS 2.54mm Solder ST Thru-Hole Poly Bag; Manufacturer: Amphenol ICC / FCI; Manufacturer Part Number: 10129381-914004BLF; Manufacturer Series: 10129381; Connector Type: BOARD CONNECTOR; Contact Pattern: RECTANGULAR; Contact Resistance: 20mR; Contact Style: SQ PIN-SKT; Dielectric Withstanding Voltage (AC): 2.1kV; Durability: 50Cycles; Insertion Force-Max: 2.502N; Insulation Resistance: 1GR; Number Of Connectors: 1; Number Of PCB Rows: 2; Rated Current (Signal): 3A; Number of Contacts: 14; Withdrawl Force-Min: 0.30024N; Body Breadth: 0.19inch; Body Depth: 0.1inch; Plating Thickness: 1uin; Reference Standard: UL; Reliability: COMMERCIAL; Supplier: Digikey; Supplier Part Number: 609-10129381-914004BLF-ND; RoHS: Yes; Category: Headers and Wire Housings; Stock: 9824; Pricing: 1=0.29, 10=0.248, 100=0.2106, 500=0.18798, 1600=0.17316, 6400=0.15701, 11200=0.15093 (USD); Mounting Technology: Board; Contact Material: Copper Alloy; Contact Finish - Mating: AU ON NI; Contact Finish - Termination: Gold (Au) - with Nickel (Ni) barrier; Insulation Color: Black; Insulation Material: Thermoplastic; Min Operating Temperature: -55°C; Max Operating Temperature: 105°C; JESD-609 Code: e4; Contact Gender: Male; Mounting Style: STRAIGHT; Number of Rows Loaded: 2; PCB Contact Pattern: RECTANGULAR; Termination: Solder; Mating Contact Pitch: 0.1inch; Mating Contact Row Spacing: 0.1inch; PCB Contact Row Spacing: 2.54mm; Terminal Length: 0.09inch; Terminal Pitch: 2.54mm; Reach SVHC Compliant: Yes; RoHS Compliant: Yes; ComponentLink1URL: https://datasheet.octopart.com/10129381-914004BLF-Amphenol-Communications-Solutions-datasheet-157857145.pdf?src-supplier=Newark; ComponentLink1Description: https://datasheet.octopart.com/10129381-914004BLF-Amphenol-Communications-Solutions-datasheet-157857145.pdf?src-supplier=Newark; ComponentLink2URL: https://datasheet.octopart.com/10129381-914004BLF-Amphenol-Communications-Solutions-datasheet-157857145.pdf?src-supplier=Farnell; ComponentLink2Description: https://datasheet.octopart.com/10129381-914004BLF-Amphenol-Communications-Solutions-datasheet-157857145.pdf?src-supplier=Farnell
footprint Header2x14
pins: 1 3V3, 2 5V, 3 GPIO2/SDA1, 4 5V, 5 GPIO3/SCL1, 6 GND, 7 GPIO4/GPIO_GCLK, 8 GPIO14/TXD0, 9 GND, 10 GPIO15/RXD0, 11 GPIO17/GPIO_GEN0, 12 GPIO18/GPIO_GEN1, 13 GPIO27/GPIO_GEN2, 14 GND